# Altium footprint library LimeMicroAltiumLib.PcbLib: 876 footprints (part 3 of 57)
Each footprint in its own frame and in the unit in brackets; x right, y up, seen from the top. Pads: shape width x height; smd on the part's side, far side on the other; paste and mask are expansions set on the pad; w line width, h text height; cw(c..) or ccw(c..) is an arc to the next point about the centre after c.
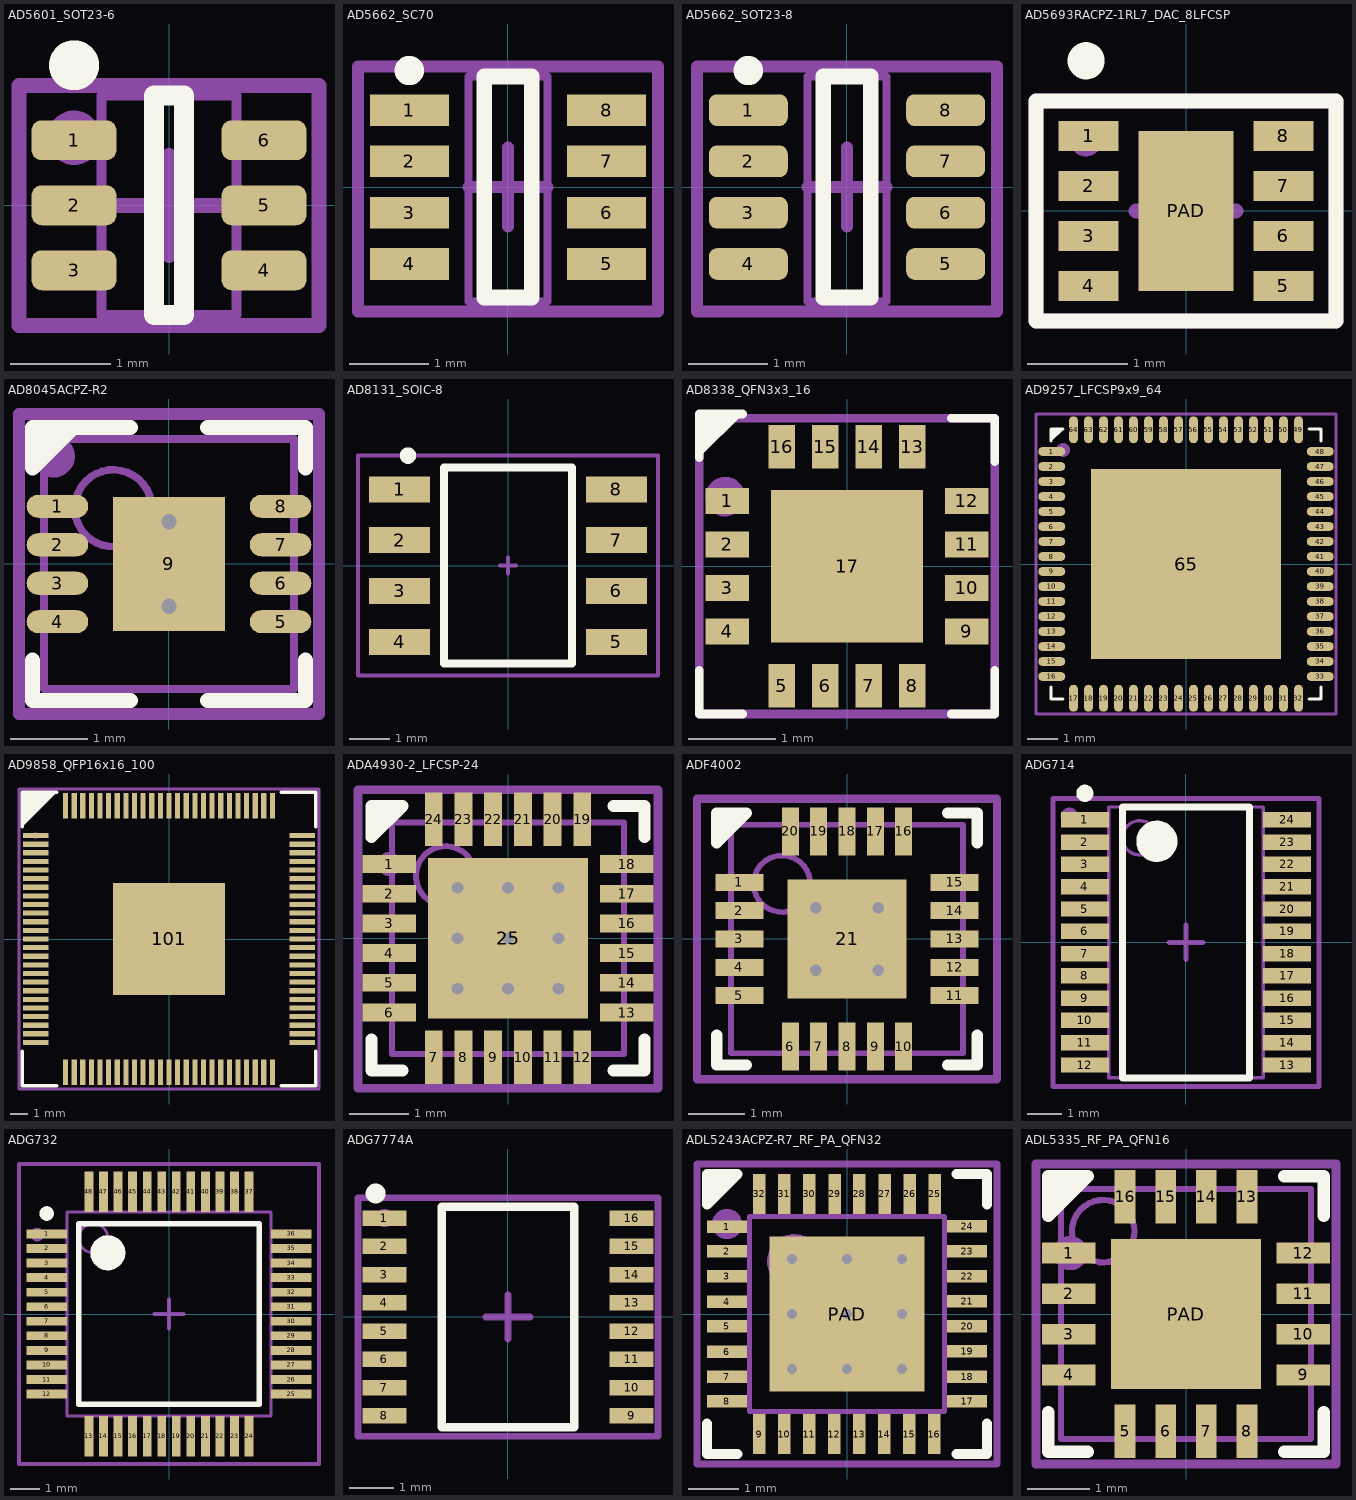
[diagram p2: the footprints below, top view; thin cyan lines are the x and y axes]

## AD5601_SOT23-6 [mm] "SOT23, 6-Leads, Body 2x1.3mm, Pitch 0.65mm, Lead Span 2.1mm, IPC Medium Density"
height 1.1
pads (6):
  rrect50% 0.85x0.4 smd mask+0.05: 1(-0.95,0.65) 2(-0.95,0) 3(-0.95,-0.65) 4(0.95,-0.65) 5(0.95,0) 6(0.95,0.65)
Top Overlay:
  circle w0.25: c-0.95,1.4 r0.125
  lines w0.2: -0.15,-1.1 0.15,-1.1 0.15,1.1 -0.15,1.1 -0.15,-1.1
Mechanical 13:
  lines w0.1: -0.675,-1.1 -0.675,1.1 0.675,1.1 0.675,-1.1 -0.675,-1.1
Mechanical 15:
  circle w0.4: c-0.95,0.675 r0.071
  lines w0.15: -0.5,0 0.5,0 ; 0,-0.5 0,0.5 ; -1.5,-1.2 -1.5,1.2 1.5,1.2 1.5,-1.2 -1.5,-1.2
  text ".Designator" at 0,0 h0.55
3D body "User Library-SC70-6.step": height 0.43, standoff -0.53, extent -1.05,-1 1.05,1

## AD5662_SC70 [mm]
pads (8):
  rect 1x0.4 smd mask+0.05: 1(-1.25,0.975) 2(-1.25,0.325) 3(-1.25,-0.325) 4(-1.25,-0.975) 5(1.25,-0.975) 6(1.25,-0.325) 7(1.25,0.325) 8(1.25,0.975)
Top Overlay:
  circle w0.3: c-1.25,1.475 r0.035
  lines w0.2: -0.3,-1.4 -0.3,1.4 0.3,1.4 0.3,-1.4 -0.3,-1.4
Mechanical 13:
  lines w0.1: -0.5,-1.45 0.5,-1.45 0.5,1.4 -0.5,1.4 -0.5,-1.45
Mechanical 15:
  circle w0.2: c-1.275,0.975 r0.056
  lines w0.15: -0.5,0 0.5,0 ; 0,-0.5 0,0.5 ; -1.9,-1.575 1.9,-1.575 1.9,1.525 -1.9,1.525 -1.9,-1.575
  text ".Designator" at 0,0 h0.55
3D body "User Library-sot238.step": height 1.2, standoff 0, extent -1.4,-1.49 1.4,1.45

## AD5662_SOT23-8 [mm]
pads (8):
  rrect50% 1x0.4 smd mask+0.05: 1(-1.25,0.975) 2(-1.25,0.325) 3(-1.25,-0.325) 4(-1.25,-0.975) 5(1.25,-0.975) 6(1.25,-0.325) 7(1.25,0.325) 8(1.25,0.975)
Top Overlay:
  circle w0.3: c-1.25,1.475 r0.035
  lines w0.2: -0.3,-1.4 -0.3,1.4 0.3,1.4 0.3,-1.4 -0.3,-1.4
Mechanical 13:
  lines w0.1: -0.5,-1.45 0.5,-1.45 0.5,1.4 -0.5,1.4 -0.5,-1.45
Mechanical 15:
  circle w0.2: c-1.275,0.975 r0.056
  lines w0.15: -0.5,0 0.5,0 ; 0,-0.5 0,0.5 ; -1.9,-1.575 1.9,-1.575 1.9,1.525 -1.9,1.525 -1.9,-1.575
  text ".Designator" at 0,0 h0.55
3D body "User Library-sot238.step": height 1.2, standoff 0, extent -1.4,-1.49 1.4,1.45

## AD5693RACPZ-1RL7_DAC_8LFCSP [mm]
pads (9):
  rect 0.6x0.3 smd mask+0.05: 1(-0.975,0.75) 2(-0.975,0.25) 3(-0.975,-0.25) 4(-0.975,-0.75) 5(0.975,-0.75) 6(0.975,-0.25) 7(0.975,0.25) 8(0.975,0.75)
  rect 0.95x1.6 smd mask+0.05: PAD(0,0)
Top Overlay:
  circle w0.3: c-1,1.5 r0.035
  lines w0.15: -1.5,-1.1 1.5,-1.1 1.5,1.1 -1.5,1.1 -1.5,-1.1
Mechanical 15:
  circle w0.2: c-1,0.7 r0.056
  lines w0.15: -0.5,0 0.5,0 ; 0,-0.5 0,0.5 ; -1.5,-1.1 -1.5,1.1 1.5,1.1 1.5,-1.1 -1.5,-1.1
  text ".Designator" at 0,0 h0.55
3D body "User Library-lfcsp-8-2.step": height 0.55, standoff -0.02, extent -1.025,-1 1.015,1

## AD8045ACPZ-R2 [mm] "QFN, 8-Leads, Body 3x3mm, Pitch 0.5mm, Thermal Pad 1.45X1.74mm, IPC High Density"
height 0.9
pads (9):
  oval 0.8x0.3 smd mask+0.05: 1(-1.45,0.75) 2(-1.45,0.25) 3(-1.45,-0.25) 4(-1.45,-0.75) 5(1.45,-0.75) 6(1.45,-0.25) 7(1.45,0.25) 8(1.45,0.75)
  rect 1.45x1.74 smd: 9(0,0)
via 0,-0.55 diameter 0.5 hole 0.2
via 0,0.55 diameter 0.5 hole 0.2
Top Overlay:
  region: -1.775,1.25 -1.775,1.75 -1.275,1.75
  lines w0.2: -1.775,-1.25 -1.775,-1.775 -0.5,-1.775 ; -1.275,1.75 -1.775,1.25 -1.775,1.775 -0.5,1.775 ; 0.5,-1.775 1.775,-1.775 1.775,-1.25 ; 0.5,1.775 1.775,1.775 1.775,1.25
Mechanical 13:
  circle w0.1: c-0.725,0.725 r0.5
  lines w0.1: -1.625,-1.625 1.625,-1.625 1.625,1.625 -1.625,1.625 -1.625,-1.625
Mechanical 15:
  circle w0.35: c-1.5,1.4 r0.1
  lines w0.15: -0.5,0 0.5,0 ; 0,-0.5 0,0.5 ; -1.95,-1.95 1.95,-1.95 1.95,1.95 -1.95,1.95 -1.95,-1.95
  text ".Designator" at 0,0 h0.55
3D body "User Library-AD8137 lfcsp.step": height 0.9, standoff -0.04, extent -1.476,-1.5 1.526,1.5

## AD8131_SOIC-8 [mm]
pads (8):
  rect 1.525x0.65 smd: 1(-2.712,1.905) 2(-2.712,0.635) 3(-2.712,-0.635) 4(-2.712,-1.905) 5(2.712,-1.905) 6(2.712,-0.635) 7(2.712,0.635) 8(2.712,1.905)
Top Overlay:
  circle w0.254: c-2.5,2.75 r0.079
  lines w0.2: -1.6,-2.45 -1.6,2.45 1.6,2.45 1.6,-2.45 -1.6,-2.45
Mechanical 15:
  circle w0.254: c-2.675,1.925 r0.079
  lines w0.1: -0.2,0 0,0 ; 0,-0.2 0,0 ; 0,0.2 0,0 ; 0.2,0 0,0 ; -3.75,-2.75 -3.75,2.75 3.75,2.75 3.75,-2.75 -3.75,-2.75
  text ".Designator" at 0,0 h0.55
3D body "AD8131ARZ.stp": height 1.75, standoff 0, extent -3,-2.45 3,2.45

## AD8338_QFN3x3_16 [mm]
pads (17):
  rect 0.5x0.3 smd mask+0.05: 1(-1.375,0.75) 2(-1.375,0.25) 3(-1.375,-0.25) 4(-1.375,-0.75) 9(1.375,-0.75) 10(1.375,-0.25) 11(1.375,0.25) 12(1.375,0.75)
  rect 0.3x0.5 smd mask+0.05: 5(-0.75,-1.375) 6(-0.25,-1.375) 7(0.25,-1.375) 8(0.75,-1.375) 13(0.75,1.375) 14(0.25,1.375) 15(-0.25,1.375) 16(-0.75,1.375)
  rect 1.75x1.75 smd mask+0.05: 17(0,0)
Top Overlay:
  region: -1.7,1.25 -1.2,1.75 -1.7,1.75
  lines w0.1: -1.7,-1.2 -1.7,-1.7 -1.2,-1.7 ; -1.7,1.25 -1.7,1.75 -1.2,1.75 ; 1.2,-1.7 1.7,-1.7 1.7,-1.2 ; 1.2,1.7 1.7,1.7 1.7,1.2
Mechanical 15:
  circle w0.254: c-1.4,0.8 r0.1
  lines w0.1: -0.2,0 0,0 ; 0,-0.2 0,0 ; 0,0.2 0,0 ; 0.2,0 0,0 ; -1.7,-1.7 -1.7,1.7 1.7,1.7 1.7,-1.7 -1.7,-1.7
  text ".Designator" at 0,0 h0.55
3D body "AD8338ACPZ-R7.stp": height 0.8, standoff 0, extent -1.55,-1.55 1.55,1.55

## AD9257_LFCSP9x9_64 [mm]
pads (65):
  oval 0.9x0.3 smd mask+0.05: 1(-4.475,3.75) 2(-4.475,3.25) 3(-4.475,2.75) 4(-4.475,2.25) 5(-4.475,1.75) 6(-4.475,1.25) 7(-4.475,0.75) 8(-4.475,0.25) 9(-4.475,-0.25) 10(-4.475,-0.75) 11(-4.475,-1.25) 12(-4.475,-1.75) 13(-4.475,-2.25) 14(-4.475,-2.75) 15(-4.475,-3.25) 16(-4.475,-3.75) 33(4.475,-3.75) 34(4.475,-3.25) 35(4.475,-2.75) 36(4.475,-2.25) 37(4.475,-1.75) 38(4.475,-1.25) 39(4.475,-0.75) 40(4.475,-0.25) 41(4.475,0.25) 42(4.475,0.75) 43(4.475,1.25) 44(4.475,1.75) 45(4.475,2.25) 46(4.475,2.75) 47(4.475,3.25) 48(4.475,3.75)
  oval 0.3x0.9 smd mask+0.05: 17(-3.75,-4.475) 18(-3.25,-4.475) 19(-2.75,-4.475) 20(-2.25,-4.475) 21(-1.75,-4.475) 22(-1.25,-4.475) 23(-0.75,-4.475) 24(-0.25,-4.475) 25(0.25,-4.475) 26(0.75,-4.475) 27(1.25,-4.475) 28(1.75,-4.475) 29(2.25,-4.475) 30(2.75,-4.475) 31(3.25,-4.475) 32(3.75,-4.475) 49(3.75,4.475) 50(3.25,4.475) 51(2.75,4.475) 52(2.25,4.475) 53(1.75,4.475) 54(1.25,4.475) 55(0.75,4.475) 56(0.25,4.475) 57(-0.25,4.475) 58(-0.75,4.475) 59(-1.25,4.475) 60(-1.75,4.475) 61(-2.25,4.475) 62(-2.75,4.475) 63(-3.25,4.475) 64(-3.75,4.475)
  rect 6.35x6.35 smd mask+0.05: 65(0,0)
Top Overlay:
  region: -4.5,4.075 -4.075,4.5 -4.5,4.5
  lines w0.1: -4.5,-4.1 -4.5,-4.5 -4.1,-4.5 ; -4.5,4.1 -4.5,4.5 -4.1,4.5 ; 4.1,-4.5 4.5,-4.5 4.5,-4.1 ; 4.1,4.5 4.5,4.5 4.5,4.1
Mechanical 15:
  circle w0.254: c-4.1,3.8 r0.1
  lines w0.1: -0.2,0 0,0 ; 0,-0.2 0,0 ; 0,0.2 0,0 ; 0.2,0 0,0 ; -5,-5 5,-5 5,5 -5,5 -5,-5
  text ".Designator" at 0,0 h0.55
3D body "User Library-LFCSP-64 AD9984AKCPZ-170.STEP": height 0.82, standoff -0.05, extent -4.5,-4.5 4.5,4.5

## AD9858_QFP16x16_100 [mm]
pads (101):
  rect 1.475x0.3 smd mask+0.05: 1(-7.738,6) 2(-7.738,5.5) 3(-7.738,5) 4(-7.738,4.5) 5(-7.738,4) 6(-7.738,3.5) 7(-7.738,3) 8(-7.738,2.5) 9(-7.738,2) 10(-7.738,1.5) 11(-7.738,1) 12(-7.738,0.5) 13(-7.738,0) 14(-7.738,-0.5) 15(-7.738,-1) 16(-7.738,-1.5) 17(-7.738,-2) 18(-7.738,-2.5) 19(-7.738,-3) 20(-7.738,-3.5) 21(-7.738,-4) 22(-7.738,-4.5) 23(-7.738,-5) 24(-7.738,-5.5) 25(-7.738,-6) 51(7.738,-6) 52(7.738,-5.5) 53(7.738,-5) 54(7.738,-4.5) 55(7.738,-4) 56(7.738,-3.5) 57(7.738,-3) 58(7.738,-2.5) 59(7.738,-2) 60(7.738,-1.5) 61(7.738,-1) 62(7.738,-0.5) 63(7.738,0) 64(7.738,0.5) 65(7.738,1) 66(7.738,1.5) 67(7.738,2) 68(7.738,2.5) 69(7.738,3) 70(7.738,3.5) 71(7.738,4) 72(7.738,4.5) 73(7.738,5) 74(7.738,5.5) 75(7.738,6)
  rect 0.3x1.475 smd mask+0.05: 26(-6,-7.738) 27(-5.5,-7.738) 28(-5,-7.738) 29(-4.5,-7.738) 30(-4,-7.738) 31(-3.5,-7.738) 32(-3,-7.738) 33(-2.5,-7.738) 34(-2,-7.738) 35(-1.5,-7.738) 36(-1,-7.738) 37(-0.5,-7.738) 38(0,-7.738) 39(0.5,-7.738) 40(1,-7.738) 41(1.5,-7.738) 42(2,-7.738) 43(2.5,-7.738) 44(3,-7.738) 45(3.5,-7.738) 46(4,-7.738) 47(4.5,-7.738) 48(5,-7.738) 49(5.5,-7.738) 50(6,-7.738) 76(6,7.738) 77(5.5,7.738) 78(5,7.738) 79(4.5,7.738) 80(4,7.738) 81(3.5,7.738) 82(3,7.738) 83(2.5,7.738) 84(2,7.738) 85(1.5,7.738) 86(1,7.738) 87(0.5,7.738) 88(0,7.738) 89(-0.5,7.738) 90(-1,7.738) 91(-1.5,7.738) 92(-2,7.738) 93(-2.5,7.738) 94(-3,7.738) 95(-3.5,7.738) 96(-4,7.738) 97(-4.5,7.738) 98(-5,7.738) 99(-5.5,7.738) 100(-6,7.738)
  rrect0% 6.5x6.5 smd: 101(0,0)
Top Overlay:
  region: -8.5,6.5 -6.5,8.5 -8.5,8.5
  lines w0.2: -8.5,-6.5 -8.5,-8.5 -6.5,-8.5 ; -8.5,6.5 -8.5,8.5 -6.5,8.5 ; 6.5,-8.5 8.5,-8.5 8.5,-6.5 ; 6.5,8.5 8.5,8.5 8.5,6.5
Mechanical 15:
  circle w0.254: c-7.75,6 r0.056
  lines w0.1: -0.2,0 0,0 ; 0,-0.2 0,0 ; 0,0.2 0,0 ; 0.2,0 0,0
  lines w0.2: -8.7,-8.7 -8.7,8.7 8.7,8.7 8.7,-8.7 -8.7,-8.7
  text ".Designator" at 0,0 h0.55
3D body "SV_100_1.step": height 1.2, standoff 0, extent -8.001,-8.001 8.001,8.001

## ADA4930-2_LFCSP-24 [mm] "QFN, 24-Leads, Body 4,00x4,00mm, Pitch 0,50mm, thermal pad, IPC Medium Density"
height 0.8
pads (25):
  rect 0.9x0.3 smd mask+0.05: 1(-2,1.25) 2(-2,0.75) 3(-2,0.25) 4(-2,-0.25) 5(-2,-0.75) 6(-2,-1.25) 13(2,-1.25) 14(2,-0.75) 15(2,-0.25) 16(2,0.25) 17(2,0.75) 18(2,1.25)
  rect 0.3x0.9 smd mask+0.05: 7(-1.25,-2) 8(-0.75,-2) 9(-0.25,-2) 10(0.25,-2) 11(0.75,-2) 12(1.25,-2) 19(1.25,2) 20(0.75,2) 21(0.25,2) 22(-0.25,2) 23(-0.75,2) 24(-1.25,2)
  rect 2.7x2.7 smd mask+0.05: 25(0,0)
via 0.85,0.85 diameter 0.5 hole 0.2
via -0.85,0.85 diameter 0.5 hole 0.2
via 0,0.85 diameter 0.5 hole 0.2
via 0,-0.85 diameter 0.5 hole 0.2
via 0.85,-0.85 diameter 0.5 hole 0.2
via -0.85,-0.85 diameter 0.5 hole 0.2
via -0.85,0 diameter 0.5 hole 0.2
via 0.85,0 diameter 0.5 hole 0.2
via 0,0 diameter 0.5 hole 0.2
Top Overlay:
  region: -2.3,1.7 -2.3,2.225 -1.775,2.225
  lines w0.2: -2.3,-1.7 -2.3,-2.225 -1.775,-2.225 ; 1.775,-2.225 2.3,-2.225 2.3,-1.7 ; 1.775,2.225 2.3,2.225 2.3,1.7 ; -2.3,1.7 -2.3,2.225 -1.775,2.225 -2.3,1.7
Mechanical 13:
  circle w0.1: c-1.05,1.05 r0.5
  lines w0.1: -1.95,-1.95 -1.95,1.95 1.95,1.95 1.95,-1.95 -1.95,-1.95
Mechanical 15:
  circle w0.35: c-2,1.25 r0.025
  lines w0.15: -0.5,0 0.5,0 ; 0,-0.5 0,0.5 ; -2.525,-2.525 -2.525,2.5 2.525,2.5 2.525,-2.525 -2.525,-2.525
  text ".Designator" at 0,0 h0.55
3D body "User Library-LFCSP-24.step": height 0.83, standoff -0.02, extent -2,-2 2,2

## ADF4002 [mm]
height 0.85
pads (21):
  rect 0.85x0.3 smd mask+0.05: 1(-1.9,1) 2(-1.9,0.5) 3(-1.9,0) 4(-1.9,-0.5) 5(-1.9,-1) 11(1.9,-1) 12(1.9,-0.5) 13(1.9,0) 14(1.9,0.5) 15(1.9,1)
  rect 0.3x0.85 smd mask+0.05: 6(-1,-1.9) 7(-0.5,-1.9) 8(0,-1.9) 9(0.5,-1.9) 10(1,-1.9) 16(1,1.9) 17(0.5,1.9) 18(0,1.9) 19(-0.5,1.9) 20(-1,1.9)
  rect 2.1x2.1 smd mask+0.05: 21(0,0)
via 0.55,-0.55 diameter 0.5 hole 0.2
via -0.55,-0.55 diameter 0.5 hole 0.2
via 0.55,0.55 diameter 0.5 hole 0.2
via -0.55,0.55 diameter 0.5 hole 0.2
Top Overlay:
  region: -2.3,1.725 -2.3,2.225 -1.8,2.225
  lines w0.2: -2.3,-1.7 -2.3,-2.225 -1.775,-2.225 ; -2.3,1.7 -2.3,2.225 -1.775,2.225 -2.287,1.713 ; 1.775,-2.225 2.3,-2.225 2.3,-1.7 ; 1.775,2.225 2.3,2.225 2.3,1.7
Mechanical 13:
  circle w0.1: c-1.15,0.975 r0.5
  lines w0.1: -2.05,-2.02 2.05,-2.02 2.05,2.02 -2.05,2.02 -2.05,-2.02
Mechanical 15:
  circle w0.2: c-2.075,1 r0.056
  lines w0.15: -0.5,0 0.5,0 ; 0,-0.5 0,0.5 ; -2.65,-2.475 2.65,-2.475 2.65,2.475 -2.65,2.475 -2.65,-2.475
  text ".Designator" at 0,0 h0.55
3D body "User Library-QFN4x4_20pins.step": height 0.8, standoff 0, extent -2.025,-2.02 2.015,2.02

## ADG714 [mm] "TSOP, 24-Leads, Body 7,80x4,40mm, Pitch 0,65mm, IPC Medium Density"
height 1.2
pads (24):
  rect 1.4x0.45 smd mask+0.05: 1(-2.95,3.575) 2(-2.95,2.925) 3(-2.95,2.275) 4(-2.95,1.625) 5(-2.95,0.975) 6(-2.95,0.325) 7(-2.95,-0.325) 8(-2.95,-0.975) 9(-2.95,-1.625) 10(-2.95,-2.275) 11(-2.95,-2.925) 12(-2.95,-3.575) 13(2.95,-3.575) 14(2.95,-2.925) 15(2.95,-2.275) 16(2.95,-1.625) 17(2.95,-0.975) 18(2.95,-0.325) 19(2.95,0.325) 20(2.95,0.975) 21(2.95,1.625) 22(2.95,2.275) 23(2.95,2.925) 24(2.95,3.575)
Top Overlay:
  circle w0.6: c-0.85,2.95 r0.3
  circle w0.25: c-2.95,4.35 r0.125
  lines w0.2: -1.85,-3.95 1.85,-3.95 1.85,3.95 -1.85,3.95 -1.85,-3.95
Mechanical 13:
  circle w0.1: c-1.35,3.05 r0.5
  lines w0.1: -2.25,-3.95 2.25,-3.95 2.25,3.95 -2.25,3.95 -2.25,-3.95
Mechanical 15:
  circle w0.35: c-3.4,3.675 r0.079
  lines w0.15: -0.5,0 0.5,0 ; 0,-0.5 0,0.5 ; -3.875,-4.2 3.875,-4.2 3.875,4.2 -3.875,4.2 -3.875,-4.2
  text ".Designator" at 0,0 h0.55
3D body "SOP65P640X110-24N.STEP": height 1.2, standoff 0, extent -3.25,-3.95 3.25,3.95

## ADG732 [mm] "TSQFP, 48-Leads, Body 7,00x7,00mm, Pitch 0,50mm, IPC Medium Density"
height 1
pads (48):
  rect 1.4x0.3 smd mask+0.05: 1(-4.2,2.75) 2(-4.2,2.25) 3(-4.2,1.75) 4(-4.2,1.25) 5(-4.2,0.75) 6(-4.2,0.25) 7(-4.2,-0.25) 8(-4.2,-0.75) 9(-4.2,-1.25) 10(-4.2,-1.75) 11(-4.2,-2.25) 12(-4.2,-2.75) 25(4.2,-2.75) 26(4.2,-2.25) 27(4.2,-1.75) 28(4.2,-1.25) 29(4.2,-0.75) 30(4.2,-0.25) 31(4.2,0.25) 32(4.2,0.75) 33(4.2,1.25) 34(4.2,1.75) 35(4.2,2.25) 36(4.2,2.75)
  rect 0.3x1.4 smd mask+0.05: 13(-2.75,-4.2) 14(-2.25,-4.2) 15(-1.75,-4.2) 16(-1.25,-4.2) 17(-0.75,-4.2) 18(-0.25,-4.2) 19(0.25,-4.2) 20(0.75,-4.2) 21(1.25,-4.2) 22(1.75,-4.2) 23(2.25,-4.2) 24(2.75,-4.2) 37(2.75,4.2) 38(2.25,4.2) 39(1.75,4.2) 40(1.25,4.2) 41(0.75,4.2) 42(0.25,4.2) 43(-0.25,4.2) 44(-0.75,4.2) 45(-1.25,4.2) 46(-1.75,4.2) 47(-2.25,4.2) 48(-2.75,4.2)
Top Overlay:
  circle w0.25: c-4.2,3.45 r0.125
  circle w0.6: c-2.1,2.1 r0.3
  lines w0.2: -3.1,-3.1 -3.1,3.1 3.1,3.1 3.1,-3.1 -3.1,-3.1
Mechanical 13:
  circle w0.1: c-2.6,2.6 r0.5
  lines w0.1: -3.5,-3.5 -3.5,3.5 3.5,3.5 3.5,-3.5 -3.5,-3.5
Mechanical 15:
  circle w0.35: c-4.525,2.725 r0.056
  lines w0.15: -0.5,0 0.5,0 ; 0,-0.5 0,0.5 ; -5.15,-5.15 -5.15,5.15 5.15,5.15 5.15,-5.15 -5.15,-5.15
  text ".Designator" at 0.05,0 h0.55
3D body "User Library-LQFP48.step": height 1.5, standoff 0, extent -4.5,-4.5 4.5,4.5

## ADG7774A [mm] "16-Lead Shrink Small Outline Package [QSOP]"
height 1.65
pads (16):
  rect 1x0.35 smd mask+0.05: 1(-2.8,2.24) 2(-2.8,1.6) 3(-2.8,0.96) 4(-2.8,0.32) 5(-2.8,-0.32) 6(-2.8,-0.96) 7(-2.8,-1.6) 8(-2.8,-2.24) 9(2.8,-2.24) 10(2.8,-1.6) 11(2.8,-0.96) 12(2.8,-0.32) 13(2.8,0.32) 14(2.8,0.96) 15(2.8,1.6) 16(2.8,2.24)
Top Overlay:
  circle w0.3: c-3,2.8 r0.075
  lines w0.2: -1.5,-2.5 -1.5,2.5 1.5,2.5 1.5,-2.5 -1.5,-2.5
Mechanical 15:
  circle w0.35: c-2.8,2.24 r0.029
  lines w0.15: -0.5,0 0.5,0 ; 0,-0.5 0,0.5 ; -3.4,-2.7 -3.4,2.7 3.4,2.7 3.4,-2.7 -3.4,-2.7
  text ".Designator" at 0,0 h0.55
3D body "User Library-MAX_QSOP16.step": height 1.76, standoff -0.01, extent -3.01,-2.49 3.01,2.49

## ADL5243ACPZ-R7_RF_PA_QFN32 [mm] "QFN, 24-Leads, Body 4,00x4,00mm, Pitch 0,50mm, Thermal Pad 2,55x2,55mm, IPC Medium Density"
height 0.8
pads (33):
  rect 0.8x0.25 smd mask+0.05: 1(-2.4,1.75) 2(-2.4,1.25) 3(-2.4,0.75) 4(-2.4,0.25) 5(-2.4,-0.25) 6(-2.4,-0.75) 7(-2.4,-1.25) 8(-2.4,-1.75) 17(2.4,-1.75) 18(2.4,-1.25) 19(2.4,-0.75) 20(2.4,-0.25) 21(2.4,0.25) 22(2.4,0.75) 23(2.4,1.25) 24(2.4,1.75)
  rect 0.25x0.8 smd mask+0.05: 9(-1.75,-2.4) 10(-1.25,-2.4) 11(-0.75,-2.4) 12(-0.25,-2.4) 13(0.25,-2.4) 14(0.75,-2.4) 15(1.25,-2.4) 16(1.75,-2.4) 25(1.75,2.4) 26(1.25,2.4) 27(0.75,2.4) 28(0.25,2.4) 29(-0.25,2.4) 30(-0.75,2.4) 31(-1.25,2.4) 32(-1.75,2.4)
  rect 3.1x3.1 smd mask+0.05: PAD(0,0)
via -1.1,-1.1 diameter 0.5 hole 0.2
via 0,-1.1 diameter 0.5 hole 0.2
via 1.1,-1.1 diameter 0.5 hole 0.2
via 1.1,1.1 diameter 0.5 hole 0.2
via 0,1.1 diameter 0.5 hole 0.2
via -1.1,1.1 diameter 0.5 hole 0.2
via 1.1,0 diameter 0.5 hole 0.2
via -1.1,0 diameter 0.5 hole 0.2
via 0,0 diameter 0.5 hole 0.2
Top Overlay:
  region: -2.8,2.185 -2.8,2.8 -2.185,2.8
  lines w0.2: -2.8,-2.185 -2.8,-2.8 -2.185,-2.8 ; 2.185,-2.8 2.8,-2.8 2.8,-2.185 ; 2.185,2.8 2.8,2.8 2.8,2.185 ; -2.8,2.185 -2.8,2.8 -2.185,2.8 -2.8,2.185
Top Solder:
  region: -2,-1.925 -1.925,-2 -1.875,-1.95 -1.95,-1.875
  region: 2,-1.925 1.925,-2 1.875,-1.95 1.95,-1.875
  region: 2,1.925 1.925,2 1.875,1.95 1.95,1.875
  region: -2,1.925 -1.925,2 -1.875,1.95 -1.95,1.875
Mechanical 13:
  circle w0.1: c-1.05,1.05 r0.5
  lines w0.1: -1.95,-1.95 -1.95,1.95 1.95,1.95 1.95,-1.95 -1.95,-1.95
Mechanical 15:
  circle w0.4: c-2.4,1.8 r0.1
  lines w0.15: -0.5,0 0.5,0 ; 0,-0.5 0,0.5 ; -3,-3 -3,3 3,3 3,-3 -3,-3
  text ".Designator" at 0,0 h0.55
3D body "User Library-qfn32-5x5.step": height 0.8, standoff 0, extent -2.52,-2.51 2.501,2.51

## ADL5335_RF_PA_QFN16 [mm]
pads (17):
  rect 0.85x0.33 smd mask+0.05: 1(-1.875,0.975) 2(-1.875,0.325) 3(-1.875,-0.325) 4(-1.875,-0.975) 9(1.875,-0.975) 10(1.875,-0.325) 11(1.875,0.325) 12(1.875,0.975)
  rect 0.33x0.85 smd mask+0.05: 5(-0.975,-1.875) 6(-0.325,-1.875) 7(0.325,-1.875) 8(0.975,-1.875) 13(0.975,1.875) 14(0.325,1.875) 15(-0.325,1.875) 16(-0.975,1.875)
  rect 2.4x2.4 smd mask+0.05: PAD(0,0)
Top Overlay:
  region: -2.2,1.575 -2.2,2.2 -1.575,2.2
  lines w0.2: -2.2,-1.575 -2.2,-2.2 -1.575,-2.2 ; 1.575,-2.2 2.2,-2.2 2.2,-1.575 ; 1.575,2.2 2.2,2.2 2.2,1.575 ; -2.2,1.575 -1.575,2.2 -2.2,2.2 -2.2,1.575
Mechanical 13:
  circle w0.1: c-1.325,1.325 r0.5
  lines w0.1: -2,-2 2,-2 2,2 -2,2 -2,-2
Mechanical 15:
  circle w0.35: c-1.85,0.975 r0.1
  lines w0.15: -0.525,0.025 0.475,0.025 ; -0.025,-0.475 -0.025,0.525 ; -2.4,-2.4 2.4,-2.4 2.4,2.4 -2.4,2.4 -2.4,-2.4
  text ".Designator" at 0,0 h0.55
3D body "User Library-qfn16-4x4.step": height 0.92, standoff 0, extent -2,-2 2,2